# Altium footprint library WR-TBL_Pluggable Connector_3.50mm.PcbLib: 175 footprints (part 1 of 11)
Each footprint in its own frame and in the unit in brackets; x right, y up, seen from the top. Pads: shape width x height; smd on the part's side, far side on the other; paste and mask are expansions set on the pad; w line width, h text height; cw(c..) or ccw(c..) is an arc to the next point about the centre after c.
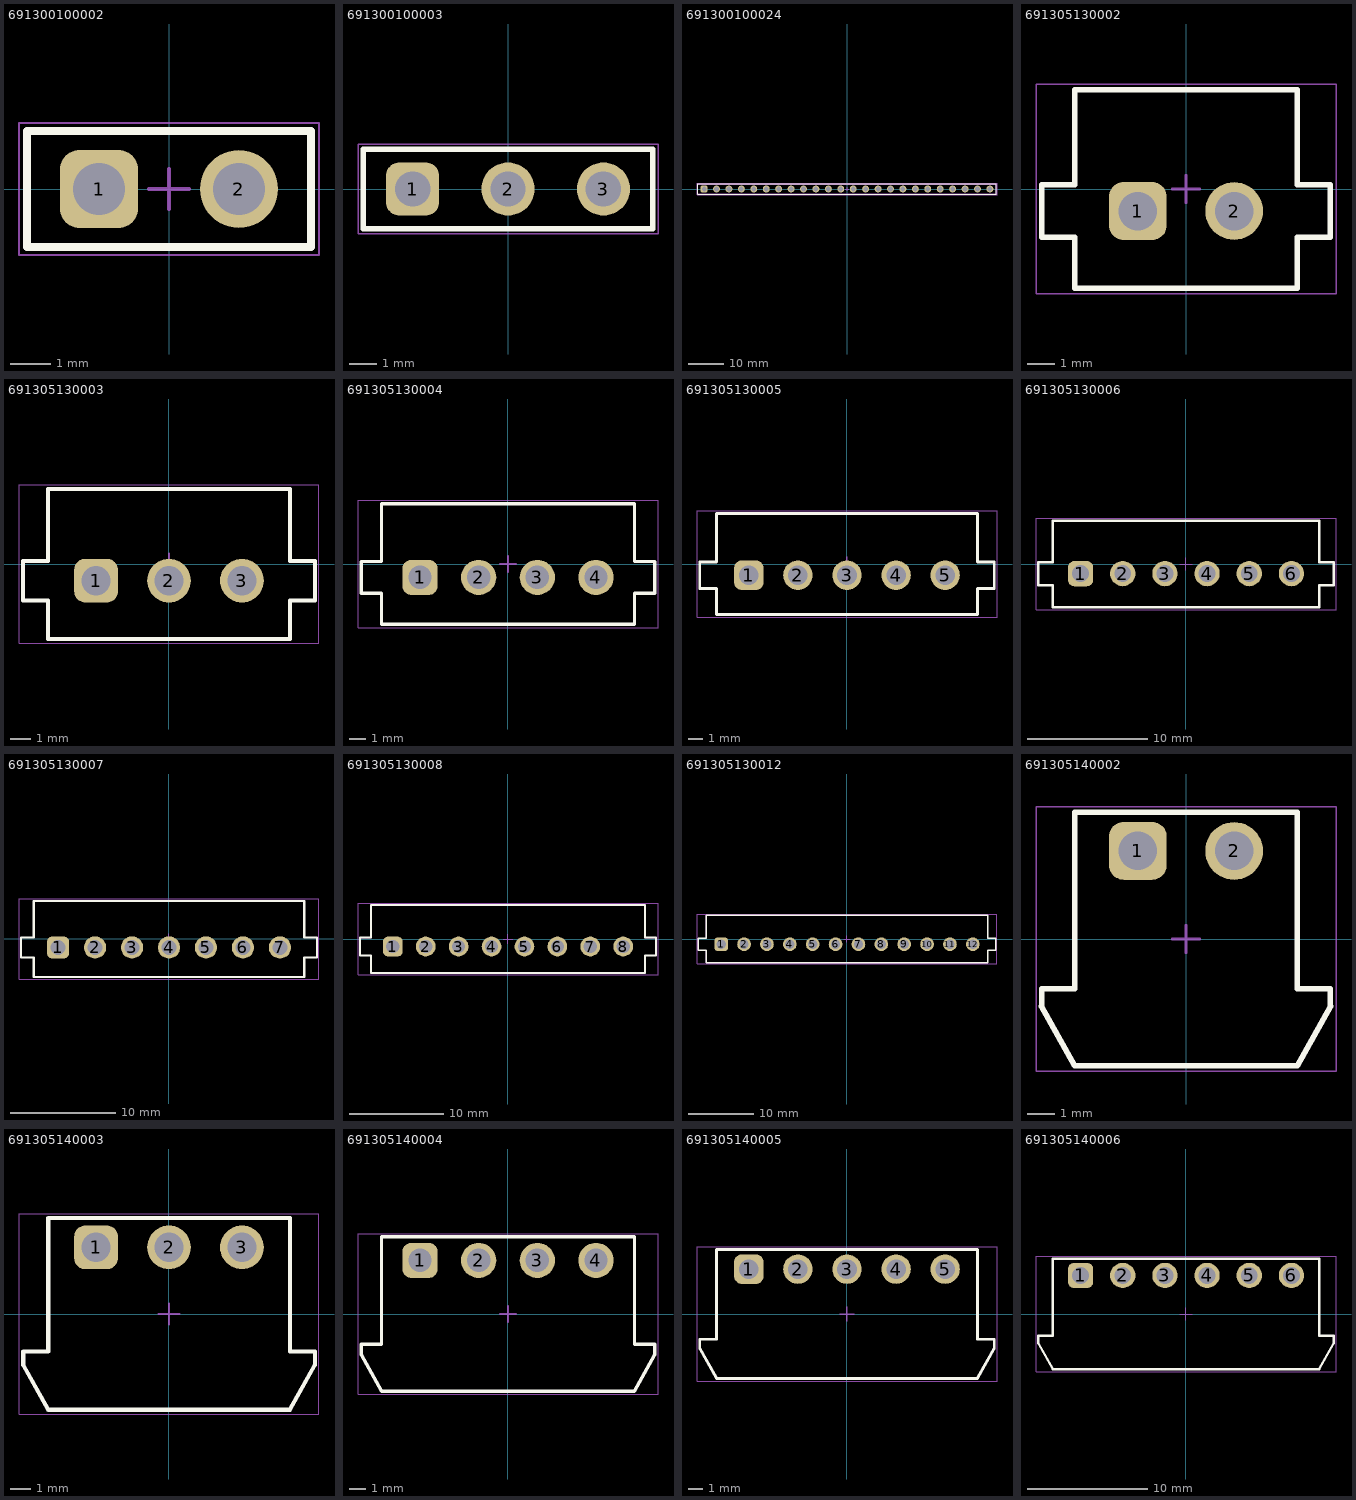
[diagram p0: the footprints below, top view; thin cyan lines are the x and y axes]

## 691300100002 [mm] "Series 3001 -  3.5mm Pin Header, 02p"
height 9
pads (2):
  rrect50% 1.95x1.95 hole 1.3: 1(-1.75,0)
  round 1.95 hole 1.3: 2(1.75,0)
Top Overlay:
  lines w0.2: -3.55,-1.45 -3.55,1.45 3.55,1.45 3.55,-1.45 -3.55,-1.45
Top Assembly:
  lines w0.1: -3.5,-1.4 -3.5,1.4 3.5,1.4 3.5,-1.4 -3.5,-1.4
Top Designator:
  text ".Designator" at -3.647,-0.357 h1
Top 3D Body:
  lines w0.1: -3.5,-1.4 -3.5,1.4 3.5,1.4 3.5,-1.4 -3.5,-1.4
Top Courtyard:
  lines w0.05: -3.75,-1.65 3.75,-1.65 3.75,1.65 -3.75,1.65 -3.75,-1.65
Top Component Center:
  lines w0.1: -0.5,0 0.5,0 ; 0,-0.5 0,0.5
3D body "691300100002.stp": height 9.05, standoff -3.45, extent -3.5,-1.4 3.5,1.4

## 691300100003 [mm] "Series 3001 -  3.5mm Pin Header, 03p"
height 9
pads (3):
  rrect50% 1.95x1.95 hole 1.3: 1(-3.5,0)
  round 1.95 hole 1.3: 2(0,0) 3(3.5,0)
Top Overlay:
  lines w0.2: -5.3,-1.45 5.3,-1.45 5.3,1.45 -5.3,1.45 -5.3,-1.45
Top Assembly:
  lines w0.1: -5.25,-1.4 5.25,-1.4 5.25,1.4 -5.25,1.4 -5.25,-1.4
Top Designator:
  text ".Designator" at -3.647,-0.357 h1
Top 3D Body:
  lines w0.1: -5.25,-1.4 5.25,-1.4 5.25,1.4 -5.25,1.4 -5.25,-1.4
Top Courtyard:
  lines w0.05: -5.5,-1.65 -5.5,1.65 5.5,1.65 5.5,-1.65 -5.5,-1.65
Top Component Center:
  lines w0.1: -0.5,0 0.5,0 ; 0,-0.5 0,0.5
3D body "691300100003.stp": height 9.05, standoff -3.45, extent -5.25,-1.4 5.25,1.4

## 691300100024 [mm] "Series 3001 -  3.5mm Pin Header, 24p"
height 9
pads (24):
  rrect50% 1.95x1.95 hole 1.3: 1(-40.25,0)
  round 1.95 hole 1.3: 2(-36.75,0) 3(-33.25,0) 4(-29.75,0) 5(-26.25,0) 6(-22.75,0) 7(-19.25,0) 8(-15.75,0) 9(-12.25,0) 10(-8.75,0) 11(-5.25,0) 12(-1.75,0) 13(1.75,0) 14(5.25,0) 15(8.75,0) 16(12.25,0) 17(15.75,0) 18(19.25,0) 19(22.75,0) 20(26.25,0) 21(29.75,0) 22(33.25,0) 23(36.75,0) 24(40.25,0)
Top Overlay:
  lines w0.2: -42.05,-1.45 -42.05,1.45 42.05,1.45 42.05,-1.45 -42.05,-1.45
Top Assembly:
  lines w0.1: -42,-1.4 -42,1.4 42,1.4 42,-1.4 -42,-1.4
Top Designator:
  text ".Designator" at -3.647,-0.357 h1
Top 3D Body:
  lines w0.1: -42,-1.4 -42,1.4 42,1.4 42,-1.4 -42,-1.4
Top Courtyard:
  lines w0.05: -42.25,-1.65 42.25,-1.65 42.25,1.65 -42.25,1.65 -42.25,-1.65
Top Component Center:
  lines w0.1: -0.5,0 0.5,0 ; 0,-0.5 0,0.5
3D body "691300100024.stp": height 9.05, standoff -3.45, extent -42,-1.4 42,1.4

## 691305130002 [mm] "Vertical PCB Header with Plastic Latch, pitch 3.5mm, 02p"
height 9.2
pads (2):
  rrect50% 2.1x2.1 hole 1.4: 1(-1.75,-0.8)
  round 2.1 hole 1.4: 2(1.75,-0.8)
Top Overlay:
  lines w0.2: -5.25,-1.75 -4.05,-1.75 -4.05,-3.6 4.05,-3.6 4.05,-1.75 5.25,-1.75 5.25,0.15 4.05,0.15 4.05,3.6 -4.05,3.6 -4.05,0.15 -5.25,0.15 -5.25,-1.75
Top Assembly:
  lines w0.1: -5.25,-1.75 -5.25,0.15 -4.05,0.15 -4.05,3.6 4.05,3.6 4.05,0.15 5.25,0.15 5.25,-1.75 4.05,-1.75 4.05,-3.6 -4.05,-3.6 -4.05,-1.75 -5.25,-1.75
Top Designator:
  text ".Designator" at -3.647,-0.357 h1
Top 3D Body:
  lines w0.1: -5.25,-1.75 -4.05,-1.75 -4.05,-3.6 4.05,-3.6 4.05,-1.75 5.25,-1.75 5.25,0.15 4.05,0.15 4.05,3.6 -4.05,3.6 -4.05,0.15 -5.25,0.15 -5.25,-1.75
Top Courtyard:
  lines w0.05: -5.45,-3.8 5.45,-3.8 5.45,3.8 -5.45,3.8 -5.45,-3.8
Top Component Center:
  lines w0.1: -0.5,0 0.5,0 ; 0,-0.5 0,0.5
3D body "691305130002.stp": height 9.25, standoff -3.45, extent -5.25,-3.6 5.25,3.6

## 691305130003 [mm] "Vertical PCB Header with Plastic Latch, pitch 3.5mm, 03p"
height 9.2
pads (3):
  rrect50% 2.1x2.1 hole 1.4: 1(-3.5,-0.8)
  round 2.1 hole 1.4: 2(0,-0.8) 3(3.5,-0.8)
Top Overlay:
  lines w0.2: -7,-1.75 -5.8,-1.75 -5.8,-3.6 5.8,-3.6 5.8,-1.75 7,-1.75 7,0.15 5.8,0.15 5.8,3.6 -5.8,3.6 -5.8,0.15 -7,0.15 -7,-1.75
Top Assembly:
  lines w0.1: -7,-1.75 -7,0.15 -5.8,0.15 -5.8,3.6 5.8,3.6 5.8,0.15 7,0.15 7,-1.75 5.8,-1.75 5.8,-3.6 -5.8,-3.6 -5.8,-1.75 -7,-1.75
Top Designator:
  text ".Designator" at -3.647,-0.357 h1
Top 3D Body:
  lines w0.1: -7,-1.75 -5.8,-1.75 -5.8,-3.6 5.8,-3.6 5.8,-1.75 7,-1.75 7,0.15 5.8,0.15 5.8,3.6 -5.8,3.6 -5.8,0.15 -7,0.15 -7,-1.75
Top Courtyard:
  lines w0.05: -7.2,-3.8 7.2,-3.8 7.2,3.8 -7.2,3.8 -7.2,-3.8
Top Component Center:
  lines w0.1: -0.5,0 0.5,0 ; 0,-0.5 0,0.5
3D body "691305130003.stp": height 9.25, standoff -3.5, extent -7,-3.6 7,3.6

## 691305130004 [mm] "Vertical PCB Header with Plastic Latch, pitch 3.5mm, 04p"
height 9.2
pads (4):
  rrect50% 2.1x2.1 hole 1.4: 1(-5.25,-0.8)
  round 2.1 hole 1.4: 2(-1.75,-0.8) 3(1.75,-0.8) 4(5.25,-0.8)
Top Overlay:
  lines w0.2: -8.75,-1.75 -7.55,-1.75 -7.55,-3.6 7.55,-3.6 7.55,-1.75 8.75,-1.75 8.75,0.15 7.55,0.15 7.55,3.6 -7.55,3.6 -7.55,0.15 -8.75,0.15 -8.75,-1.75
Top Assembly:
  lines w0.1: -8.75,-1.75 -8.75,0.15 -7.55,0.15 -7.55,3.6 7.55,3.6 7.55,0.15 8.75,0.15 8.75,-1.75 7.55,-1.75 7.55,-3.6 -7.55,-3.6 -7.55,-1.75 -8.75,-1.75
Top Designator:
  text ".Designator" at -3.647,-0.357 h1
Top 3D Body:
  lines w0.1: -8.75,-1.75 -7.55,-1.75 -7.55,-3.6 7.55,-3.6 7.55,-1.75 8.75,-1.75 8.75,0.15 7.55,0.15 7.55,3.6 -7.55,3.6 -7.55,0.15 -8.75,0.15 -8.75,-1.75
Top Courtyard:
  lines w0.05: -8.95,-3.8 8.95,-3.8 8.95,3.8 -8.95,3.8 -8.95,-3.8
Top Component Center:
  lines w0.1: -0.5,0 0.5,0 ; 0,-0.5 0,0.5
3D body "691305130004.stp": height 9.25, standoff -3.45, extent -8.75,-3.6 8.75,3.6

## 691305130005 [mm] "Vertical PCB Header with Plastic Latch, pitch 3.5mm, 05p"
height 9.2
pads (5):
  rrect50% 2.1x2.1 hole 1.4: 1(-7,-0.8)
  round 2.1 hole 1.4: 2(-3.5,-0.8) 3(0,-0.8) 4(3.5,-0.8) 5(7,-0.8)
Top Overlay:
  lines w0.2: -10.5,-1.75 -10.5,0.15 -9.3,0.15 -9.3,3.6 9.3,3.6 9.3,0.15 10.5,0.15 10.5,-1.75 9.3,-1.75 9.3,-3.6 -9.3,-3.6 -9.3,-1.75 -10.5,-1.75
Top Assembly:
  lines w0.1: -10.5,-1.75 -9.3,-1.75 -9.3,-3.6 9.3,-3.6 9.3,-1.75 10.5,-1.75 10.5,0.15 9.3,0.15 9.3,3.6 -9.3,3.6 -9.3,0.15 -10.5,0.15 -10.5,-1.75
Top Designator:
  text ".Designator" at -3.647,-0.357 h1
Top 3D Body:
  lines w0.1: -10.5,-1.75 -10.5,0.15 -9.3,0.15 -9.3,3.6 9.3,3.6 9.3,0.15 10.5,0.15 10.5,-1.75 9.3,-1.75 9.3,-3.6 -9.3,-3.6 -9.3,-1.75 -10.5,-1.75
Top Courtyard:
  lines w0.05: -10.7,-3.8 -10.7,3.8 10.7,3.8 10.7,-3.8 -10.7,-3.8
Top Component Center:
  lines w0.1: -0.5,0 0.5,0 ; 0,-0.5 0,0.5
3D body "691305130005.stp": height 9.25, standoff -3.5, extent -10.5,-3.6 10.5,3.6

## 691305130006 [mm] "Vertical PCB Header with Plastic Latch, pitch 3.5mm, 06p"
height 9.2
pads (6):
  rrect50% 2.1x2.1 hole 1.4: 1(-8.75,-0.8)
  round 2.1 hole 1.4: 2(-5.25,-0.8) 3(-1.75,-0.8) 4(1.75,-0.8) 5(5.25,-0.8) 6(8.75,-0.8)
Top Overlay:
  lines w0.2: -12.25,-1.75 -12.25,0.15 -11.05,0.15 -11.05,3.6 11.05,3.6 11.05,0.15 12.25,0.15 12.25,-1.75 11.05,-1.75 11.05,-3.6 -11.05,-3.6 -11.05,-1.75 -12.25,-1.75
Top Assembly:
  lines w0.1: -12.25,-1.75 -11.05,-1.75 -11.05,-3.6 11.05,-3.6 11.05,-1.75 12.25,-1.75 12.25,0.15 11.05,0.15 11.05,3.6 -11.05,3.6 -11.05,0.15 -12.25,0.15 -12.25,-1.75
Top Designator:
  text ".Designator" at -3.647,-0.357 h1
Top 3D Body:
  lines w0.1: -12.25,-1.75 -12.25,0.15 -11.05,0.15 -11.05,3.6 11.05,3.6 11.05,0.15 12.25,0.15 12.25,-1.75 11.05,-1.75 11.05,-3.6 -11.05,-3.6 -11.05,-1.75 -12.25,-1.75
Top Courtyard:
  lines w0.05: -12.45,-3.8 -12.45,3.8 12.45,3.8 12.45,-3.8 -12.45,-3.8
Top Component Center:
  lines w0.1: -0.5,0 0.5,0 ; 0,-0.5 0,0.5
3D body "691305130006.stp": height 9.25, standoff -3.5, extent -12.25,-3.6 12.25,3.6

## 691305130007 [mm] "Vertical PCB Header with Plastic Latch, pitch 3.5mm, 07p"
height 9.2
pads (7):
  rrect50% 2.1x2.1 hole 1.4: 1(-10.5,-0.8)
  round 2.1 hole 1.4: 2(-7,-0.8) 3(-3.5,-0.8) 4(0,-0.8) 5(3.5,-0.8) 6(7,-0.8) 7(10.5,-0.8)
Top Overlay:
  lines w0.2: -14,-1.75 -12.8,-1.75 -12.8,-3.6 12.8,-3.6 12.8,-1.75 14,-1.75 14,0.15 12.8,0.15 12.8,3.6 -12.8,3.6 -12.8,0.15 -14,0.15 -14,-1.75
Top Assembly:
  lines w0.1: -14,-1.75 -14,0.15 -12.8,0.15 -12.8,3.6 12.8,3.6 12.8,0.15 14,0.15 14,-1.75 12.8,-1.75 12.8,-3.6 -12.8,-3.6 -12.8,-1.75 -14,-1.75
Top Designator:
  text ".Designator" at -3.647,-0.357 h1
Top 3D Body:
  lines w0.1: -14,-1.75 -12.8,-1.75 -12.8,-3.6 12.8,-3.6 12.8,-1.75 14,-1.75 14,0.15 12.8,0.15 12.8,3.6 -12.8,3.6 -12.8,0.15 -14,0.15 -14,-1.75
Top Courtyard:
  lines w0.05: -14.2,-3.8 14.2,-3.8 14.2,3.8 -14.2,3.8 -14.2,-3.8
Top Component Center:
  lines w0.1: -0.5,0 0.5,0 ; 0,-0.5 0,0.5
3D body "691305130007.stp": height 9.25, standoff -3.45, extent -14,-3.6 14,3.6

## 691305130008 [mm] "Vertical PCB Header with Plastic Latch, pitch 3.5mm, 08p"
height 9.2
pads (8):
  rrect50% 2.1x2.1 hole 1.4: 1(-12.25,-0.8)
  round 2.1 hole 1.4: 2(-8.75,-0.8) 3(-5.25,-0.8) 4(-1.75,-0.8) 5(1.75,-0.8) 6(5.25,-0.8) 7(8.75,-0.8) 8(12.25,-0.8)
Top Overlay:
  lines w0.2: -15.75,-1.75 -14.55,-1.75 -14.55,-3.6 14.55,-3.6 14.55,-1.75 15.75,-1.75 15.75,0.15 14.55,0.15 14.55,3.6 -14.55,3.6 -14.55,0.15 -15.75,0.15 -15.75,-1.75
Top Assembly:
  lines w0.1: -15.75,-1.75 -15.75,0.15 -14.55,0.15 -14.55,3.6 14.55,3.6 14.55,0.15 15.75,0.15 15.75,-1.75 14.55,-1.75 14.55,-3.6 -14.55,-3.6 -14.55,-1.75 -15.75,-1.75
Top Designator:
  text ".Designator" at -3.647,-0.357 h1
Top 3D Body:
  lines w0.1: -15.75,-1.75 -14.55,-1.75 -14.55,-3.6 14.55,-3.6 14.55,-1.75 15.75,-1.75 15.75,0.15 14.55,0.15 14.55,3.6 -14.55,3.6 -14.55,0.15 -15.75,0.15 -15.75,-1.75
Top Courtyard:
  lines w0.05: -15.95,-3.8 15.95,-3.8 15.95,3.8 -15.95,3.8 -15.95,-3.8
Top Component Center:
  lines w0.1: -0.5,0 0.5,0 ; 0,-0.5 0,0.5
3D body "691305130008.stp": height 9.25, standoff -3.45, extent -15.75,-3.6 15.75,3.6

## 691305130012 [mm] "Vertical PCB Header with Plastic Latch, pitch 3.5mm, 12p"
height 9.2
pads (12):
  rrect50% 2.1x2.1 hole 1.4: 1(-19.25,-0.8)
  round 2.1 hole 1.4: 2(-15.75,-0.8) 3(-12.25,-0.8) 4(-8.75,-0.8) 5(-5.25,-0.8) 6(-1.75,-0.8) 7(1.75,-0.8) 8(5.25,-0.8) 9(8.75,-0.8) 10(12.25,-0.8) 11(15.75,-0.8) 12(19.25,-0.8)
Top Overlay:
  lines w0.2: -22.75,-1.75 -21.55,-1.75 -21.55,-3.6 21.55,-3.6 21.55,-1.75 22.75,-1.75 22.75,0.15 21.55,0.15 21.55,3.6 -21.55,3.6 -21.55,0.15 -22.75,0.15 -22.75,-1.75
Top Assembly:
  lines w0.1: -22.75,-1.75 -22.75,0.15 -21.55,0.15 -21.55,3.6 21.55,3.6 21.55,0.15 22.75,0.15 22.75,-1.75 21.55,-1.75 21.55,-3.6 -21.55,-3.6 -21.55,-1.75 -22.75,-1.75
Top Designator:
  text ".Designator" at -3.647,-0.357 h1
Top 3D Body:
  lines w0.1: -22.75,-1.75 -21.55,-1.75 -21.55,-3.6 21.55,-3.6 21.55,-1.75 22.75,-1.75 22.75,0.15 21.55,0.15 21.55,3.6 -21.55,3.6 -21.55,0.15 -22.75,0.15 -22.75,-1.75
Top Courtyard:
  lines w0.05: -22.95,-3.8 22.95,-3.8 22.95,3.8 -22.95,3.8 -22.95,-3.8
Top Component Center:
  lines w0.1: -0.5,0 0.5,0 ; 0,-0.5 0,0.5
3D body "691305130012.stp": height 9.25, standoff -3.45, extent -22.75,-3.6 22.75,3.6

## 691305140002 [mm] "Horizontal PCB Header with Plastic Latch, pitch 3.5mm, 02p"
height 7
pads (2):
  rrect50% 2.1x2.1 hole 1.4: 1(-1.75,3.2)
  round 2.1 hole 1.4: 2(1.75,3.2)
Top Overlay:
  lines w0.2: -5.251,-2.451 -4.05,-4.6 4.05,-4.6 5.251,-2.451 ; -5.25,-2.45 -5.25,-1.8 -4.05,-1.8 -4.05,4.6 4.05,4.6 4.05,-1.8 5.25,-1.8 5.25,-2.45
Top Assembly:
  lines w0.1: -5.251,-2.451 -4.05,-4.6 4.05,-4.6 5.251,-2.451 ; -5.25,-2.45 -5.25,-1.8 -4.05,-1.8 -4.05,4.6 4.05,4.6 4.05,-1.8 5.25,-1.8 5.25,-2.45
Top Designator:
  text ".Designator" at -3.647,-0.357 h1
Top 3D Body:
  lines w0.1: -5.251,-2.451 -4.05,-4.6 4.05,-4.6 5.251,-2.451 ; -5.25,-2.45 -5.25,-1.8 -4.05,-1.8 -4.05,4.6 4.05,4.6 4.05,-1.8 5.25,-1.8 5.25,-2.45
Top Courtyard:
  lines w0.05: -5.45,-4.8 -5.45,4.8 5.45,4.8 5.45,-4.8 -5.45,-4.8
Top Component Center:
  lines w0.1: -0.5,0 0.5,0 ; 0,-0.5 0,0.5
3D body "691305140002.stp": height 7.25, standoff -3.45, extent -5.25,-4.6 5.25,4.6

## 691305140003 [mm] "Horizontal PCB Header with Plastic Latch, pitch 3.5mm, 03p"
height 7
pads (3):
  rrect50% 2.1x2.1 hole 1.4: 1(-3.5,3.2)
  round 2.1 hole 1.4: 2(0,3.2) 3(3.5,3.2)
Top Overlay:
  lines w0.2: -7.001,-2.451 -5.8,-4.6 5.8,-4.6 7.001,-2.451 ; -7,-2.45 -7,-1.8 -5.8,-1.8 -5.8,4.6 5.8,4.6 5.8,-1.8 7,-1.8 7,-2.45
Top Assembly:
  lines w0.1: -7.001,-2.451 -5.8,-4.6 5.8,-4.6 7.001,-2.451 ; -7,-2.45 -7,-1.8 -5.8,-1.8 -5.8,4.6 5.8,4.6 5.8,-1.8 7,-1.8 7,-2.45
Top Designator:
  text ".Designator" at -3.647,-0.357 h1
Top 3D Body:
  lines w0.1: -7.001,-2.451 -5.8,-4.6 5.8,-4.6 7.001,-2.451 ; -7,-2.45 -7,-1.8 -5.8,-1.8 -5.8,4.6 5.8,4.6 5.8,-1.8 7,-1.8 7,-2.45
Top Courtyard:
  lines w0.05: -7.2,-4.8 -7.2,4.8 7.2,4.8 7.2,-4.8 -7.2,-4.8
Top Component Center:
  lines w0.1: -0.5,0 0.5,0 ; 0,-0.5 0,0.5
3D body "691305140003.stp": height 7.25, standoff -3.45, extent -7,-4.6 7,4.6

## 691305140004 [mm] "Horizontal PCB Header with Plastic Latch, pitch 3.5mm, 04p"
height 7
pads (4):
  rrect50% 2.1x2.1 hole 1.4: 1(-5.25,3.2)
  round 2.1 hole 1.4: 2(-1.75,3.2) 3(1.75,3.2) 4(5.25,3.2)
Top Overlay:
  lines w0.2: -8.751,-2.451 -7.55,-4.6 7.55,-4.6 8.751,-2.451 ; -8.75,-2.45 -8.75,-1.8 -7.55,-1.8 -7.55,4.6 7.55,4.6 7.55,-1.8 8.75,-1.8 8.75,-2.45
Top Assembly:
  lines w0.1: -8.751,-2.451 -7.55,-4.6 7.55,-4.6 8.751,-2.451 ; -8.75,-2.45 -8.75,-1.8 -7.55,-1.8 -7.55,4.6 7.55,4.6 7.55,-1.8 8.75,-1.8 8.75,-2.45
Top Designator:
  text ".Designator" at -3.647,-0.357 h1
Top 3D Body:
  lines w0.1: -8.751,-2.451 -7.55,-4.6 7.55,-4.6 8.751,-2.451 ; -8.75,-2.45 -8.75,-1.8 -7.55,-1.8 -7.55,4.6 7.55,4.6 7.55,-1.8 8.75,-1.8 8.75,-2.45
Top Courtyard:
  lines w0.05: -8.95,-4.8 8.95,-4.8 8.95,4.8 -8.95,4.8 -8.95,-4.8
Top Component Center:
  lines w0.1: -0.5,0 0.5,0 ; 0,-0.5 0,0.5
3D body "691305140004.stp": height 7.25, standoff -3.45, extent -8.75,-4.6 8.75,4.6

## 691305140005 [mm] "Horizontal PCB Header with Plastic Latch, pitch 3.5mm, 05p"
height 7
pads (5):
  rrect50% 2.1x2.1 hole 1.4: 1(-7,3.2)
  round 2.1 hole 1.4: 2(-3.5,3.2) 3(0,3.2) 4(3.5,3.2) 5(7,3.2)
Top Overlay:
  lines w0.2: -10.501,-2.451 -9.3,-4.6 9.3,-4.6 10.501,-2.451 ; -10.5,-2.45 -10.5,-1.8 -9.3,-1.8 -9.3,4.6 9.3,4.6 9.3,-1.8 10.5,-1.8 10.5,-2.45
Top Assembly:
  lines w0.1: -10.501,-2.451 -9.3,-4.6 9.3,-4.6 10.501,-2.451 ; -10.5,-2.45 -10.5,-1.8 -9.3,-1.8 -9.3,4.6 9.3,4.6 9.3,-1.8 10.5,-1.8 10.5,-2.45
Top Designator:
  text ".Designator" at -3.647,-0.357 h1
Top 3D Body:
  lines w0.1: 10.5,-2.45 10.5,-1.8 9.3,-1.8 9.3,4.6 -9.3,4.6 -9.3,-1.8 -10.5,-1.8 -10.5,-2.45 -9.3,-4.6 9.3,-4.6 10.501,-2.45
Top Courtyard:
  lines w0.05: -10.7,-4.8 -10.7,4.8 10.7,4.8 10.7,-4.8 -10.7,-4.8
Top Component Center:
  lines w0.1: -0.5,0 0.5,0 ; 0,-0.5 0,0.5
3D body "691305140005.stp": height 7.25, standoff -3.45, extent -10.5,-4.6 10.5,4.6

## 691305140006 [mm] "Horizontal PCB Header with Plastic Latch, pitch 3.5mm, 06p"
height 7
pads (6):
  rrect50% 2.1x2.1 hole 1.4: 1(-8.75,3.2)
  round 2.1 hole 1.4: 2(-5.25,3.2) 3(-1.75,3.2) 4(1.75,3.2) 5(5.25,3.2) 6(8.75,3.2)
Top Overlay:
  lines w0.2: -12.251,-2.451 -11.05,-4.6 11.05,-4.6 12.251,-2.451 ; -12.25,-2.45 -12.25,-1.8 -11.05,-1.8 -11.05,4.6 11.05,4.6 11.05,-1.8 12.25,-1.8 12.25,-2.45
Top Assembly:
  lines w0.1: -12.251,-2.451 -11.05,-4.6 11.05,-4.6 12.251,-2.451 ; -12.25,-2.45 -12.25,-1.8 -11.05,-1.8 -11.05,4.6 11.05,4.6 11.05,-1.8 12.25,-1.8 12.25,-2.45
Top Designator:
  text ".Designator" at -3.647,-0.357 h1
Top 3D Body:
  lines w0.1: -12.251,-2.451 -11.05,-4.6 11.05,-4.6 12.251,-2.451 ; -12.25,-2.45 -12.25,-1.8 -11.05,-1.8 -11.05,4.6 11.05,4.6 11.05,-1.8 12.25,-1.8 12.25,-2.45
Top Courtyard:
  lines w0.05: -12.45,-4.8 -12.45,4.8 12.45,4.8 12.45,-4.8 -12.45,-4.8
Top Component Center:
  lines w0.1: -0.5,0 0.5,0 ; 0,-0.5 0,0.5
3D body "691305140006.stp": height 7.25, standoff -3.45, extent -12.25,-4.6 12.25,4.6